# Altium footprint library JST_S6B-XH-SM4-TB.PcbLib: 1 footprints
Each footprint in its own frame and in the unit in brackets; x right, y up, seen from the top. Pads: shape width x height; smd on the part's side, far side on the other; paste and mask are expansions set on the pad; w line width, h text height; cw(c..) or ccw(c..) is an arc to the next point about the centre after c.
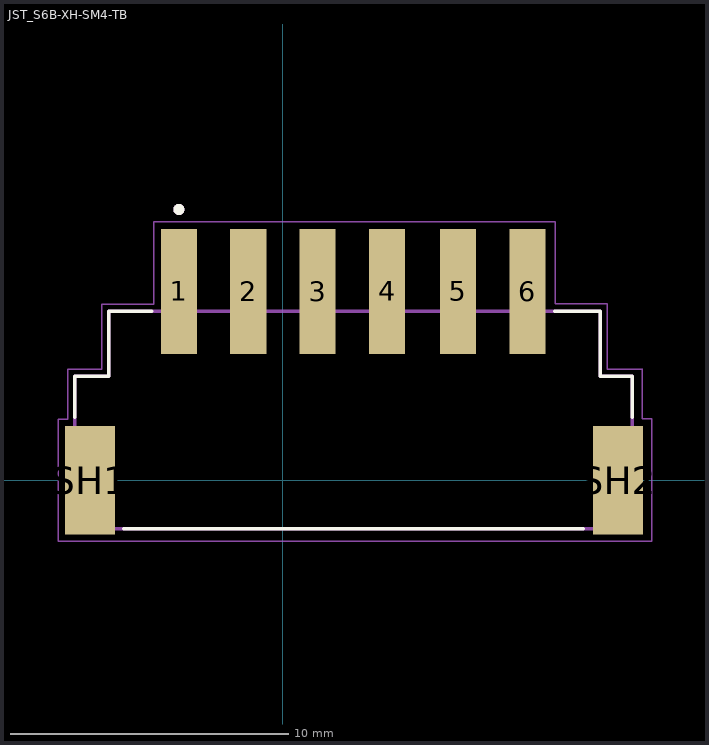
[diagram p0: the footprint, top view; thin cyan lines are the x and y axes]

## JST_S6B-XH-SM4-TB [mm]
height 6
pads (8):
  rect 1.3x4.5 smd: 1(-3.75,6.8) 2(-1.25,6.8) 3(1.25,6.8) 4(3.75,6.8) 5(6.3,6.804) 6(8.8,6.804)
  rect 1.8x3.9 smd: SH1(-6.95,0) SH2(12.065,0)
Top Overlay:
  circle w0.2: c-3.75,9.75 r0.1
  lines w0.127: -7.5,2.27 -7.5,3.75 -6.275,3.75 -6.275,6.08 -4.72,6.08 ; -5.73,-1.75 10.814,-1.756 ; 9.779,6.08 11.43,6.08 11.43,3.75 12.573,3.75 12.573,2.27
Assembly Top:
  circle w0.2: c-3.75,9.75 r0.1
  lines w0.127: -7.5,-1.75 12.573,-1.75 12.573,3.75 11.43,3.75 11.43,6.08 -6.275,6.08 -6.275,3.75 -7.5,3.75 -7.5,-1.75
Courtyard Top:
  lines w0.05: 9.807,9.3 -4.65,9.3 -4.65,6.33 -6.525,6.33 -6.525,4 -7.75,4 -7.75,2.2 -8.1,2.2 -8.1,-2.2 13.28,-2.2 ; 9.807,9.301 9.807,6.35 11.684,6.35 11.684,4.004 12.933,4.004 ; 12.933,4.011 12.933,2.211 13.28,2.211 13.28,-2.189
3D body "S6B-XH-SM4-TB--3DModel-STEP-56544.STEP": height 6.12, standoff 0, extent -7.46,-1.823 12.54,8.177